# Altium schematic symbol library Fred,.SchLib: 50 symbols (part 1 of 2)
Pins are listed as number, name and electrical type; pins without a type are passive.

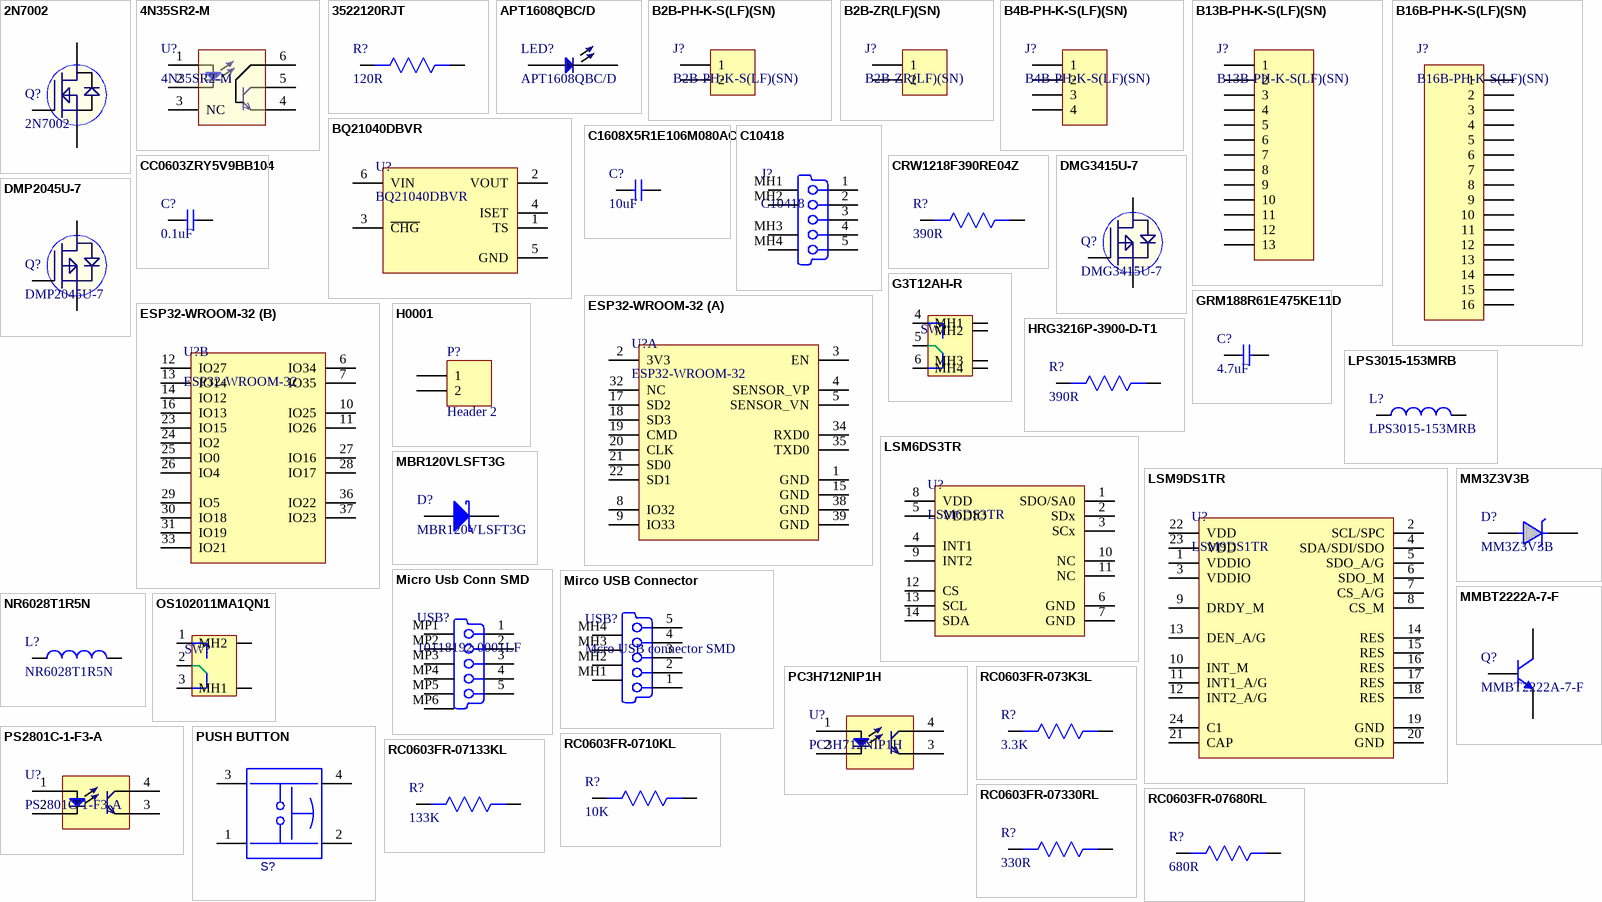
[diagram p0: symbols 2N7002 to RC0603FR-07680RL]

## 2N7002
designator Q?
MOSFET N-CH 60V 115MA SOT-23; Manufacturer: ON Semiconductor / Fairchild; Max Power Dissipation: 200mW; Drain to Source Resistance: 1.2R; Gate to Source Voltage (Vgs): 20V; Nominal Vgs: 2.1V; Number of Elements: 1; Element Configuration: Single; Input Capacitance: 50pF; Rds On Max: 7.5R; On-State Resistance: 5.3R; Supplier 1: Digi-Key; Manufacturer Part Number: 2N7002; Stock 1: 809412; Pricing 1: 1=0.39, 10=0.358, 100=0.2007, 500=0.1075, 1000=0.0731 (USD); Mount: Surface Mount; Case/Package: SOT-23; Number of Pins: 3; Contact Plating: Matte,Tin; Min Operating Temperature: -55°C; Max Operating Temperature: 150°C; Continuous Drain Current (ID): 115mA; Packaging: Tape and Reel; Package Quantity: 1; Drain to Source Breakdown Voltage: 60V; Power Dissipation: 200mW; Threshold Voltage: 2.1V; Drain to Source Voltage (Vdss): 60V; Voltage Rating (DC): 60V; Current Rating: 115mA; Dual Supply Voltage: 60V; Current: 115mA; Voltage: 60V; Length: 2.92mm; Height: 0.93mm; Width: 3.05mm; Radiation Hardening: No; REACH SVHC: No SVHC; Lead Free: Lead Free; ComponentLink1URL: http://www.farnell.com/datasheets/2299562.pdf?src-supplier=Farnell; ComponentLink1Description: http://www.farnell.com/datasheets/2299562.pdf?src-supplier=Farnell; ComponentLink2URL: http://www.rapidonline.com/pdf/47-0120.pdf?src-supplier=Rapid+Electronics; ComponentLink2Description: http://www.rapidonline.com/pdf/47-0120.pdf?src-supplier=Rapid+Electronics; ComponentLink3URL: https://www.fairchildsemi.com/package-drawings/MA/MA03B.pdf?src-supplier=Digi-Key; ComponentLink3Description: https://www.fairchildsemi.com/package-drawings/MA/MA03B.pdf?src-supplier=Digi-Key; ComponentLink4URL: http://www.farnell.com/datasheets/2299562.pdf?src-supplier=Newark; ComponentLink4Description: http://www.farnell.com/datasheets/2299562.pdf?src-supplier=Newark; ComponentLink5URL: https://www.onsemi.com/pub/Collateral/NDS7002A-D.PDF?src-supplier=Digi-Key; ComponentLink5Description: https://www.onsemi.com/pub/Collateral/NDS7002A-D.PDF?src-supplier=Digi-Key; ComponentLink6URL: http://www.farnell.com/datasheets/2161371.pdf?src-supplier=Element14; ComponentLink6Description: http://www.farnell.com/datasheets/2161371.pdf?src-supplier=Element14; ComponentLink7URL: http://www.farnell.com/datasheets/2299562.pdf?src-supplier=Element14; ComponentLink7Description: http://www.farnell.com/datasheets/2299562.pdf?src-supplier=Element14; ComponentLink8URL: https://www.verical.com/server-webapp/html/getDatasheet?partID=93547&src-supplier=Verical; ComponentLink8Description: https://www.verical.com/server-webapp/html/getDatasheet?partID=93547&src-supplier=Verical; ComponentLink9URL: http://www.fairchildsemi.com/ds/2N/2N7002.pdf?src-supplier=Future+Electronics; ComponentLink9Description: http://www.fairchildsemi.com/ds/2N/2N7002.pdf?src-supplier=Future+Electronics; ComponentLink10URL: https://www.fairchildsemi.com/datasheets/ND/NDS7002A.pdf?src-supplier=Avnet; ComponentLink10Description: https://www.fairchildsemi.com/datasheets/ND/NDS7002A.pdf?src-supplier=Avnet; ComponentLink11URL: http://www.farnell.com/datasheets/660093.pdf?src-supplier=Element14; ComponentLink11Description: http://www.farnell.com/datasheets/660093.pdf?src-supplier=Element14; Supplier Part Number 1: 2N7002NCT-ND
footprint SOT23-3 (SOT23, 3-Leads, Body 2.9x1.3mm, Pitch 0.95mm, Lead Span 2.3mm - Reverse Pinning, IPC High Density)
pins: 1 G, 2 S, 3 D

## 4N35SR2-M
designator U?
OPTOISO 4.17KV TRANS W/BASE 6SMD; Manufacturer: ON Semiconductor / Fairchild; Number of Channels: 1; Collector Emitter Voltage (VCEO): 300mV; Output Voltage: 30V; Max Power Dissipation: 150mW; Isolation Voltage: 7.5kV; Reverse Breakdown Voltage: 6V; Forward Voltage: 1.5V; Forward Current: 60mA; Power Dissipation: 250mW; Rise Time: 2us; Supplier 1: Digi-Key; Manufacturer Part Number: 4N35SR2-M; Stock 1: 7245; Pricing 1: 1=0.76, 10=0.59, 100=0.4214, 500=0.3203 (USD); Mount: Surface Mount; Case/Package: SMD/SMT; Number of Pins: 6; Weight: 0.81g; Contact Plating: Tin,Matte; Min Operating Temperature: -40°C; Max Operating Temperature: 100°C; Packaging: Tape and Reel; Package Quantity: 1000; Collector Emitter Saturation Voltage: 300mV; Number of Elements: 1; Max Input Current: 60mA; Max Output Voltage: 30V; Number of Circuits: 1; Input Current: 60mA; Fall Time: 2us; Radiation Hardening: No; Lead Free: Lead Free; REACH SVHC: No SVHC; ComponentLink1URL: https://datasheet.ciiva.com/15118/getdatasheetpartid-91040-15118536.pdf; ComponentLink1Description: https://datasheet.ciiva.com/15118/getdatasheetpartid-91040-15118536.pdf; ComponentLink2URL: https://datasheet.ciiva.com/16924/4n25sr2vm-16924344.pdf; ComponentLink2Description: https://datasheet.ciiva.com/16924/4n25sr2vm-16924344.pdf; ComponentLink3URL: https://datasheet.ciiva.com/2085/4n25m-2085930.pdf; ComponentLink3Description: https://datasheet.ciiva.com/2085/4n25m-2085930.pdf; ComponentLink4URL: https://datasheet.ciiva.com/22654/1930104-22654266.pdf; ComponentLink4Description: https://datasheet.ciiva.com/22654/1930104-22654266.pdf; ComponentLink5URL: https://datasheet.ciiva.com/2085/4n25m-2085931.pdf; ComponentLink5Description: https://datasheet.ciiva.com/2085/4n25m-2085931.pdf; ComponentLink6URL: https://datasheet.ciiva.com/3305/4n25m-3305947.pdf; ComponentLink6Description: https://datasheet.ciiva.com/3305/4n25m-3305947.pdf; ComponentLink7URL: https://datasheet.ciiva.com/22654/683405-22654267.pdf; ComponentLink7Description: https://datasheet.ciiva.com/22654/683405-22654267.pdf; ComponentLink8URL: https://datasheet.ciiva.com/2085/4n25m-2085932.pdf; ComponentLink8Description: https://datasheet.ciiva.com/2085/4n25m-2085932.pdf; ComponentLink9URL: https://datasheet.ciiva.com/26121/4n25m-26121741.pdf; ComponentLink9Description: https://datasheet.ciiva.com/26121/4n25m-26121741.pdf; ComponentLink10URL: https://datasheet.ciiva.com/8084/4n25m-8084975.pdf; ComponentLink10Description: https://datasheet.ciiva.com/8084/4n25m-8084975.pdf; Supplier Part Number 1: 4N35SR2MCT-ND
footprint 4N25/35M SM (4N25/35M SurfaceMount FP)
pins: 1 An, 2 Ca, 3 NC, 4 E, 5 C, 6 B

## 3522120RJT
designator R?, comment 120R
RES SMD 120 OHM 5% 3W 2512; Manufacturer: TE Connectivity CGS; Manufacturer Part Number: 3522120RJT; Voltage Rating: 250V; Number of Resistors: 1; Temperature Coefficient: 100ppm/°C; Supplier 1: Digi-Key; Stock 1: 33369; Pricing 1: 1=0.65, 10=0.541, 100=0.3634, 1000=0.21265 (USD); Mount: Surface Mount; Case/Package: 2512; Case Code (Metric): 6432; Case Code (Imperial): 2512; Min Operating Temperature: -55°C; Max Operating Temperature: 105°C; Resistance: 120R; Power Rating: 3W; Packaging: Tape and Reel; Composition: Power resistor,Thick Film; Termination: Solder; Tolerance: 5%; Voltage Rating (DC): 250V; Number of Terminations: 2; Length: 6.35mm; Height: 1.1mm; Depth: 3.2mm; REACH SVHC: Unknown; Supplier Part Number 1: A121132CT-ND
footprint Res2512
pins: 1, 2

## APT1608QBC/D
designator LED?
LED BLUE CLEAR CHIP SMD; Manufacturer: Kingbright; Lens Color: Clear,Colorless; Luminous Intensity: 100mcd; Viewing Angle: 120°; Lens Style: Clear,Flat; Forward Current: 20mA; Forward Voltage: 3.3V; Dominant Wavelength: 465nm; Number of LEDs: 1; Supplier 1: Digi-Key; Manufacturer Part Number: APT1608QBC/D; Stock 1: 106851; Pricing 1: 1=0.49, 10=0.35, 25=0.286, 100=0.2288, 250=0.19304, 500=0.16446, 1000=0.1287 (USD); Mount: Surface Mount; Case/Package: 0603; Number of Pins: 2; Color: Blue; Case Code (Metric): 1608; Case Code (Imperial): 0603; Min Operating Temperature: -40°C; Max Operating Temperature: 85°C; Package Quantity: 2000; Packaging: Tape and Reel; Illumination Color: Blue; Lens Transparency: Clear; Test Current: 20mA; Length: 1.6mm; Height: 0.75mm; Width: 0.8mm; Lead Free: Lead Free; ComponentLink1URL: http://www.kingbrightusa.com/images/catalog/SPEC/APT1608QBC-D.pdf?src-supplier=Digi-Key; ComponentLink1Description: http://www.kingbrightusa.com/images/catalog/SPEC/APT1608QBC-D.pdf?src-supplier=Digi-Key; ComponentLink2URL: http://www.mouser.com/ds/2/216/APT1608QBC-D-65281.pdf?src-supplier=Mouser; ComponentLink2Description: http://www.mouser.com/ds/2/216/APT1608QBC-D-65281.pdf?src-supplier=Mouser; Supplier Part Number 1: 754-1434-1-ND
footprint LED 0603 (LED BLUE CLEAR CHIP SMD)
pins: 1, 2

## B2B-PH-K-S(LF)(SN)
designator J?
CONN HEADER VERT 2POS 2MM; Manufacturer: JST; Supplier 1: Digi-Key; Manufacturer Part Number: B2B-PH-K-S(LF)(SN); Stock 1: 36331; Pricing 1: 1=0.17, 10=0.162, 100=0.1002, 500=0.08288, 1000=0.07252, 5000=0.06216, 10000=0.06044 (USD); Weight: 0.0625lb; Length: 0.2inch; Height: 0.35inch; Width: 0.24inch; Supplier Part Number 1: 455-1704-ND
footprint B2B-PH-K-S(LF)(SN)
pins: 1, 2

## B2B-ZR(LF)(SN)
designator J?
CONN HEADER VERT 2POS 1.5MM; Manufacturer: JST; Body Plating: Tin; Number of Positions: 2; Connector Type: Header,Male Pin; Contact Resistance: 30mR; Current Rating: 1A; Insulation Resistance: 500MR; Voltage Rating: 50V; Gender: Male; Panel Thickness: 3.5mm; Supplier 1: Arrow; Manufacturer Part Number: B2B-ZR(LF)(SN); Stock 1: 6766; Pricing 1: 1=0.1706, 10=0.1605, 100=0.0982, 500=0.0747 (USD); Mount: Through Hole; Color: White; Contact Plating: Tin,Copper; Contact Material: Brass,Copper,Tin; Housing Material: Polyamide; Material: Nylon; Housing Color: Beige; Contact Shape: Circular; Insulation Material: Nylon; Insulation Color: Natural; Min Operating Temperature: -25°C; Max Operating Temperature: 85°C; Number of Rows: 1; Packaging: Bulk; Termination: Solder; Max Current Rating: 1A; Voltage Rating (AC): 50V; Voltage Rating (DC): 50V; Fastening Type: Detent; Max Voltage Rating (AC): 50V; Number of Contacts: 2; Orientation: Straight; Length: 4.5mm; Pitch: 1.5mm; Lead Pitch: 1.5mm; Contact Mating Length: 0.094inch; Depth: 3.5mm; Lead Free: Lead Free; REACH SVHC: No SVHC; Flammability Rating: UL94 V-0; ComponentLink1URL: https://www.verical.com/server-webapp/html/getDatasheet?partID=643133&src-supplier=Verical; ComponentLink1Description: https://www.verical.com/server-webapp/html/getDatasheet?partID=643133&src-supplier=Verical; ComponentLink2URL: http://uk.rs-online.com/webdocs/13ec/0900766b813eca01.pdf?src-supplier=RSComponents; ComponentLink2Description: http://uk.rs-online.com/webdocs/13ec/0900766b813eca01.pdf?src-supplier=RSComponents; ComponentLink3URL: http://www.farnell.com/datasheets/80551.pdf?src-supplier=Element14; ComponentLink3Description: http://www.farnell.com/datasheets/80551.pdf?src-supplier=Element14; ComponentLink4URL: http://uk.rs-online.com/webdocs/13ed/0900766b813ed0cc.pdf?src-supplier=RSComponents; ComponentLink4Description: http://uk.rs-online.com/webdocs/13ed/0900766b813ed0cc.pdf?src-supplier=RSComponents; ComponentLink5URL: http://www.jst-mfg.com/product/pdf/eng/eZH.pdf?src-supplier=Digi-Key; ComponentLink5Description: http://www.jst-mfg.com/product/pdf/eng/eZH.pdf?src-supplier=Digi-Key; Supplier Part Number 1: B2B-ZR (LF)(SN)
footprint B2B-ZR(LF)(SN) (CONN HEADER VERT 2POS 1.5MM)
pins: 1, 2

## B4B-PH-K-S(LF)(SN)
designator J?
CONN HEADER VERT 4POS 2MM; Manufacturer: JST; Current Rating: 2A; Voltage Rating: 100V; Contact Resistance: 20mR; Number of Poles: 4; Insulation Resistance: 1MR; Gender: Male; Connector Type: Male Pin; Supplier 1: Digi-Key; Manufacturer Part Number: B4B-PH-K-S(LF)(SN); Stock 1: 60295; Pricing 1: 1=0.24, 10=0.227, 100=0.1573, 500=0.13312, 1000=0.10892, 5000=0.09682, 10000=0.08774 (USD); Mount: Through Hole; Number of Pins: 4; Contact Material: Brass,Tin; Contact Plating: Tin,Copper; Color: Natural; Housing Color: White; Housing Material: Polyamide; Material: Polyamide; Min Operating Temperature: -25°C; Max Operating Temperature: 85°C; Number of Rows: 1; Max Current Rating: 2A; Voltage Rating (AC): 100V; Packaging: Bulk; Number of Positions: 4; Termination: Solder; Fastening Type: Detent; Number of Contacts: 4; Max Voltage Rating (AC): 100V; Max Voltage Rating (DC): 100V; Working Voltage: 100V; Orientation: Straight; Length: 9.9mm; Height: 9.4mm; Width: 4.5mm; Pitch: 2mm; Lead Pitch: 2mm; Contact Mating Length: 0.13inch; Depth: 4.5mm; REACH SVHC: No SVHC; Lead Free: Lead Free; ComponentLink1URL: http://www.jst-mfg.com/product/pdf/eng/ePH.pdf?src-supplier=Digi-Key; ComponentLink1Description: http://www.jst-mfg.com/product/pdf/eng/ePH.pdf?src-supplier=Digi-Key; ComponentLink2URL: http://www.jst-mfg.com/product/pdf/eng/ePH.pdf?src-supplier=Future+Electronics; ComponentLink2Description: http://www.jst-mfg.com/product/pdf/eng/ePH.pdf?src-supplier=Future+Electronics; ComponentLink3URL: http://www.produktinfo.conrad.com/datenblaetter/725000-749999/741223-da-01-en-STIFTLEISTE_GERADE_4_POL_RM2_0.pdf?src-supplier=Conrad; ComponentLink3Description: http://www.produktinfo.conrad.com/datenblaetter/725000-749999/741223-da-01-en-STIFTLEISTE_GERADE_4_POL_RM2_0.pdf?src-supplier=Conrad; Supplier Part Number 1: 455-1706-ND
footprint B4B-PH-K-S(LF)(SN)
pins: 1, 2, 3, 4

## B13B-PH-K-S(LF)(SN)
designator J?
CONN HEADER VERT 13POS 2MM; Manufacturer: JST; Current Rating: 2A; Number of Positions: 13; Gender: Male; Connector Type: Male Pin; Pitch: 0.079inch; Supplier 1: Digi-Key; Manufacturer Part Number: B13B-PH-K-S(LF)(SN); Stock 1: 5302; Pricing 1: 1=0.59, 10=0.549, 100=0.4206, 500=0.36574, 1000=0.30173, 5000=0.26516, 10000=0.24687 (USD); Mount: Through Hole; Contact Material: Tin; Color: Natural; Contact Plating: Tin; Housing Color: Natural; Number of Rows: 1; Packaging: Bulk; Termination: Press-Fit; Fastening Type: Detent; Number of Contacts: 13; Length: 27.9mm; Height: 9.4mm; Width: 4.5mm; Contact Mating Length: 0.13inch; Lead Free: Lead Free; Supplier Part Number 1: 455-1715-ND
footprint B13B-PH-K-S(LF)(SN)
pins: 1, 2, 3, 4, 5, 6, 7, 8, 9, 10, 11, 12, 13

## B16B-PH-K-S(LF)(SN)
designator J?
CONN HEADER VERT 16POS 2MM; Manufacturer: JST; Current Rating: 2A; Number of Positions: 16; Gender: Male; Connector Type: Male Pin; Voltage Rating: 100V; Insulation Resistance: 1GR; Pitch: 0.079inch; ComponentLink1URL: http://www.jst-mfg.com/product/pdf/eng/ePH.pdf?src-supplier=Digi-Key; ComponentLink1Description: http://www.jst-mfg.com/product/pdf/eng/ePH.pdf?src-supplier=Digi-Key; Supplier 1: Digi-Key; Manufacturer Part Number: B16B-PH-K-S(LF)(SN); Stock 1: 3736; Pricing 1: 1=0.76, 10=0.717, 100=0.5495, 500=0.47782, 1000=0.3942, 5000=0.34641, 10000=0.32252 (USD); Mount: Through Hole; Color: Natural; Contact Plating: Tin; Housing Color: Natural; Contact Material: Brass; Material: Polyamide; Min Operating Temperature: -25°C; Max Operating Temperature: 85°C; Number of Rows: 1; Packaging: Bulk; Termination: Press-Fit; Fastening Type: Detent; Number of Contacts: 16; Contact Mating Length: 0.13inch; Lead Free: Lead Free; Supplier Part Number 1: 455-1718-ND
footprint B16B-PH-K-S(LF)(SN) (CONN HEADER VERT 16POS 2MM)
pins: 1, 2, 3, 4, 5, 6, 7, 8, 9, 10, 11, 12, 13, 14, 15, 16

## BQ21040DBVR
designator U?
IC BAT CHG LI-ION 1 CELL SOT23-6; Manufacturer: Texas Instruments; Number of Cells: 1; Supplier 1: Digi-Key; Manufacturer Part Number: BQ21040DBVR; Stock 1: 10857; Pricing 1: 1=1.14, 10=1.015, 100=0.7912, 500=0.65364, 1000=0.51603 (USD); Lead Free: Lead Free; Supplier Part Number 1: 296-47315-1-ND
footprint BQ21040DBVR
pins: 1 TS, 2 VOUT, 3 ~{CHG}, 4 ISET, 5 GND, 6 VIN

## C1608X5R1E106M080AC
designator C?, comment 10uF
CAP CER 10UF 25V X5R 0603; Manufacturer: TDK; Manufacturer Part Number: C1608X5R1E106M080AC; Dielectric Material: Ceramic; Tolerance: 20%; Supplier 1: Digi-Key; Stock 1: 61681; Pricing 1: 1=0.96, 10=0.704, 100=0.483, 500=0.38238, 1000=0.322 (USD); Mount: Surface Mount; Case/Package: 0603; Weight: 7.1E-05oz; Case Code (Imperial): 0603; Case Code (Metric): 1608; Min Operating Temperature: -55°C; Max Operating Temperature: 85°C; Capacitance: 10uF; Packaging: Tape and Reel; Voltage Rating: 25V; Voltage Rating (DC): 25V; Termination: SMD/SMT; Package Quantity: 1; Dielectric: X5R; Composition: Ceramic; Length: 1.6mm; Height: 0.8mm; Width: 0.8mm; Thickness: 0.039inch; Depth: 0.8mm; Lead Free: Lead Free; REACH SVHC: No SVHC; Supplier Part Number 1: 445-9015-1-ND
footprint Cap0603
pins: 1, 2

## C10418
designator J?
USB - Micro B Female USB 2 5 SMD USB Connectors RoHS; Manufacturer: Jing Extension of the Electronic Co.; Gender: Receptacle; Connector Type: USB,Receptacle; Number of Contacts: 5; Number of Ports: 1; Manufacturer Part Number: C10418; Mount: Surface Mount,Horizontal; Number of Terminals: 5; Termination: Solder; Orientation: Right Angle; ComponentLink1URL: http://www.amphenol-icc.com/media/wysiwyg/files/drawing/10118194.pdf?src-supplier=Digi-Key; ComponentLink1Description: http://www.amphenol-icc.com/media/wysiwyg/files/drawing/10118194.pdf?src-supplier=Digi-Key; ComponentLink2URL: https://cdn.amphenol-icc.com/media/wysiwyg/files/drawing/10118194.pdf?src-supplier=Mouser; ComponentLink2Description: https://cdn.amphenol-icc.com/media/wysiwyg/files/drawing/10118194.pdf?src-supplier=Mouser; ComponentLink3URL: https://cdn.amphenol-icc.com/media/wysiwyg/files/drawing/10118194.pdf?src-supplier=Verical; ComponentLink3Description: https://cdn.amphenol-icc.com/media/wysiwyg/files/drawing/10118194.pdf?src-supplier=Verical; Link: https://lcsc.com/product-detail/USB-Connectors_Jing-Extension-of-the-Electronic-Co-C10418_C10418.html
footprint C10418 (USB - Micro B Female USB 2 5 SMD USB Connectors RoHS)
pins: 1 V BUS (5V) "USB Vcc [Red]", 2 D- "USB Data - [White]", 3 D+ "USB Data + [Green]", 4 NC "Not Connected (or joined to pin 5 via resistor)", 5 GND "Ground [Black]", MH1 Tab "Shell", MH2 Tab "Shell", MH3 Tab "Shell", MH4 Tab "Shell"

## CC0603ZRY5V9BB104
designator C?, comment 0.1uF
CAP CER 0.1UF 50V Y5V 0603; Manufacturer: Yageo; Manufacturer Part Number: CC0603ZRY5V9BB104; Capacitance: 100nF; Tolerance: 80%; Supplier 1: Digi-Key; Stock 1: 15000880; Pricing 1: 1=0.1, 10=0.075, 100=0.0334, 500=0.02386, 1000=0.01874 (USD); Mount: Surface Mount; Case/Package: 0603; Number of Pins: 2; Case Code (Metric): 1608; Case Code (Imperial): 0603; Min Operating Temperature: -30°C; Max Operating Temperature: 85°C; Dielectric: Y5V; Voltage Rating: 50V; Package Quantity: 1; Packaging: Tape and Reel; Voltage Rating (DC): 50V; Termination: SMD/SMT; Composition: Ceramic; Voltage: 50V; Length: 1.6mm; Height: 0.8mm; Width: 0.031inch; Thickness: 0.035inch; Depth: 0.8mm; Radiation Hardening: No; REACH SVHC: No SVHC; Lead Free: Lead Free; Halogen Free: Halogen Free; ComponentLink1URL: http://www.yageo.com/documents/recent/UPY-GPHC_Y5V_6.3V-to-50V_8.pdf?src-supplier=Digi-Key; ComponentLink1Description: http://www.yageo.com/documents/recent/UPY-GPHC_Y5V_6.3V-to-50V_8.pdf?src-supplier=Digi-Key; ComponentLink2URL: http://www.yageo.com/documents/recent/UPY-GPHC_Y5V_6.3V-to-50V_5.pdf?src-supplier=Avnet+Europe; ComponentLink2Description: http://www.yageo.com/documents/recent/UPY-GPHC_Y5V_6.3V-to-50V_5.pdf?src-supplier=Avnet+Europe; ComponentLink3URL: https://www.verical.com/server-webapp/html/getDatasheet?partID=403611&src-supplier=Verical; ComponentLink3Description: https://www.verical.com/server-webapp/html/getDatasheet?partID=403611&src-supplier=Verical; ComponentLink4URL: http://www.mouser.com/ds/2/447/Yageo_UPY-GP_NP0_16V-to-50V_9-358835.pdf?src-supplier=Mouser; ComponentLink4Description: http://www.mouser.com/ds/2/447/Yageo_UPY-GP_NP0_16V-to-50V_9-358835.pdf?src-supplier=Mouser; ComponentLink5URL: http://www.farnell.com/datasheets/1132289.pdf?src-supplier=Element14; ComponentLink5Description: http://www.farnell.com/datasheets/1132289.pdf?src-supplier=Element14; Supplier Part Number 1: 311-1343-1-ND
footprint Cap0603
pins: 1, 2

## CRW1218F390RE04Z
designator R?, comment 390R
RES SMD 390 OHM ±1% 1W ±100ppm/℃ 1218 Chip Resistor; Manufacturer: Ever Ohms Tech; Manufacturer Part No.: CRW1218F390RE04Z; Case/Package: 1218; Resistance: 390R; Termination: SMD/SMT; ComponentLink1URL: http://www.yageo.com.tw/exep/pages/download/literatures/PYu-R_INT-thick_7.pdf?src-supplier=Digi-Key; ComponentLink1Description: http://www.yageo.com.tw/exep/pages/download/literatures/PYu-R_INT-thick_7.pdf?src-supplier=Digi-Key; ComponentLink2URL: http://www.yageo.com/documents/recent/PYu-RC_Group_51_RoHS_L_10.pdf?src-supplier=Digi-Key; ComponentLink2Description: http://www.yageo.com/documents/recent/PYu-RC_Group_51_RoHS_L_10.pdf?src-supplier=Digi-Key; ComponentLink3URL: http://www.yageo.com/documents/recent/PYu-RC_Group_51_RoHS_L_9.pdf?src-supplier=Digi-Key; ComponentLink3Description: http://www.yageo.com/documents/recent/PYu-RC_Group_51_RoHS_L_9.pdf?src-supplier=Digi-Key; ComponentLink4URL: http://www.farnell.com/datasheets/443971.pdf?src-supplier=Element14; ComponentLink4Description: http://www.farnell.com/datasheets/443971.pdf?src-supplier=Element14; Supplier: LCSC; Supplier Part No.: C175553; Link: https://lcsc.com/product-detail/Chip-Resistor-Surface-Mount_Ever-Ohms-Tech-CR1218F390RE04_C175553.html
footprint Res1218
pins: 1, 2

## DMG3415U-7
designator Q?
MOSFET P-CH 20V 4A SOT-23; Manufacturer: Diodes; Rise Time: 117ns; Gate to Source Voltage (Vgs): 8V; Fall Time: 393ns; Turn-Off Delay Time: 795ns; Turn-On Delay Time: 71ns; Rds On Max: 39mR; Input Capacitance: 294pF; Nominal Vgs: -550mV; Number of Elements: 1; Max Power Dissipation: 900mW; Drain to Source Resistance: 42.5mR; Element Configuration: Single; Drain to Source Breakdown Voltage: -20V; Supplier 1: Digi-Key; Manufacturer Part Number: DMG3415U-7; Stock 1: 330988; Pricing 1: 1=0.54, 10=0.38, 100=0.2493, 500=0.1473, 1000=0.1133 (USD); Mount: Surface Mount; Case/Package: SOT-23; Number of Pins: 3; Weight: 0.000282oz; Contact Plating: Matte,Tin; Min Operating Temperature: -55°C; Max Operating Temperature: 150°C; Continuous Drain Current (ID): 4A; Packaging: Tape and Reel; Package Quantity: 3000; Drain to Source Voltage (Vdss): 20V; Number of Channels: 1; Power Dissipation: 900mW; Threshold Voltage: -550mV; On-State Resistance: 42.5mR; Length: 2.9mm; Height: 1mm; Width: 1.3mm; Radiation Hardening: No; REACH SVHC: No SVHC; Lead Free: Lead Free; ComponentLink1URL: http://www.diodes.com/datasheets/ds31735.pdf?src-supplier=Avnet; ComponentLink1Description: http://www.diodes.com/datasheets/ds31735.pdf?src-supplier=Avnet; ComponentLink2URL: https://www.diodes.com/assets/Datasheets/ds31735.pdf?src-supplier=Digi-Key; ComponentLink2Description: https://www.diodes.com/assets/Datasheets/ds31735.pdf?src-supplier=Digi-Key; ComponentLink3URL: http://www.mouser.com/ds/2/115/ds31735-64958.pdf?src-supplier=Mouser; ComponentLink3Description: http://www.mouser.com/ds/2/115/ds31735-64958.pdf?src-supplier=Mouser; ComponentLink4URL: http://www.farnell.com/datasheets/1915618.pdf?src-supplier=Element14; ComponentLink4Description: http://www.farnell.com/datasheets/1915618.pdf?src-supplier=Element14; ComponentLink5URL: http://www.diodes.com/_files/datasheets/ds31735.pdf?src-supplier=Future+Electronics; ComponentLink5Description: http://www.diodes.com/_files/datasheets/ds31735.pdf?src-supplier=Future+Electronics; Supplier Part Number 1: DMG3415UDIDKR-ND
footprint SOT23-3 (SOT23, 3-Leads, Body 2.9x1.3mm, Pitch 0.95mm, Lead Span 2.3mm - Reverse Pinning, IPC High Density)
pins: 1 G, 2 S, 3 D

## DMP2045U-7
designator Q?
MOSFET P-CHAN 24V SOT23
footprint SOT23-3 (SOT23, 3-Leads, Body 2.9x1.3mm, Pitch 0.95mm, Lead Span 2.3mm - Reverse Pinning, IPC High Density)
pins: 1 G, 2 S, 3 D

## ESP32-WROOM-32
designator U?
SMD MODULE, ESP32-D0WDQ6, 32MBIT; Manufacturer: Espressif Systems; Supplier 1: Digi-Key; Manufacturer Part Number: ESP32-WROOM-32; Stock 1: 968; Pricing 1: 1=3.8 (USD); Supplier Part Number 1: 1904-1010-1-ND
footprint ESP32-WROOM-32 (SMD MODULE, ESP32-D0WDQ6, 32MBIT)
part A pins: 1 GND, 2 3V3, 3 EN, 4 SENSOR_VP, 5 SENSOR_VN, 8 IO32, 9 IO33, 15 GND, 17 SD2, 18 SD3, 19 CMD, 20 CLK, 21 SD0, 22 SD1, 32 NC, 34 RXD0, 35 TXD0, 38 GND, 39 GND
part B pins: 6 IO34, 7 IO35, 10 IO25, 11 IO26, 12 IO27, 13 IO14, 14 IO12, 16 IO13, 23 IO15, 24 IO2, 25 IO0, 26 IO4, 27 IO16, 28 IO17, 29 IO5, 30 IO18, 31 IO19, 33 IO21, 36 IO22, 37 IO23

## G3T12AH-R
designator SW?  (value not drawn)
Toggle Switch SPDT Surface Mount, Right Angle 0.4VA 28V; Manufacturer: NKK Switches; Actuator Material: Polyphenylene; Max Current Rating: 100mA; Illumination Type: Non-Illuminated,Illuminated; Electrical Life: 50000Cycles; Switch Function: On-On; Actuator Type: Standard Round; Actuator Length: 3.81mm; ComponentLink1URL: http://www.jameco.com/Jameco/Products/ProdDS/588220.pdf?src-supplier=Jameco; ComponentLink1Description: http://www.jameco.com/Jameco/Products/ProdDS/588220.pdf?src-supplier=Jameco; ComponentLink2URL: http://uk.rs-online.com/webdocs/1263/0900766b81263f61.pdf?src-supplier=RSComponents; ComponentLink2Description: http://uk.rs-online.com/webdocs/1263/0900766b81263f61.pdf?src-supplier=RSComponents; ComponentLink3URL: http://www.farnell.com/datasheets/1683358.pdf?src-supplier=Element14; ComponentLink3Description: http://www.farnell.com/datasheets/1683358.pdf?src-supplier=Element14; ComponentLink4URL: http://www1.futureelectronics.com/doc/C%20-%20K%20COMPONENTS/OS102011MA1QN1.pdf?src-supplier=Future+Electronics; ComponentLink4Description: http://www1.futureelectronics.com/doc/C%20-%20K%20COMPONENTS/OS102011MA1QN1.pdf?src-supplier=Future+Electronics; ComponentLink5URL: https://www.ckswitches.com/media/1428/os.pdf?src-supplier=Digi-Key; ComponentLink5Description: https://www.ckswitches.com/media/1428/os.pdf?src-supplier=Digi-Key; ComponentLink6URL: https://www.alliedelec.com/m/d/08271ccc8b1809c6b911a7d3c93f3e8a.pdf?src-supplier=Allied+Electronics; ComponentLink6Description: https://www.alliedelec.com/m/d/08271ccc8b1809c6b911a7d3c93f3e8a.pdf?src-supplier=Allied+Electronics; ComponentLink7URL: http://www.farnell.com/datasheets/2674787.pdf?src-supplier=Newark; ComponentLink7Description: http://www.farnell.com/datasheets/2674787.pdf?src-supplier=Newark; Supplier 1: Digi-Key; Manufacturer Part Number: G3T12AH-R; Stock 1: 1957; Pricing 1: 1=5.17, 10=4.928, 25=4.8048, 50=4.6816, 100=4.5584, 250=4.1888 (USD); Mount: Surface Mount; Case/Package: SMD/SMT; Contact Material: Bronze; Contact Plating: Gold; Housing Material: Resin; Min Operating Temperature: -30°C; Max Operating Temperature: 85°C; Package Quantity: 1; Voltage Rating (AC): 28V; Voltage Rating (DC): 28V; Packaging: Tape and Reel; Throw Configuration: SPDT; Max Voltage Rating (AC): 28V; Max Voltage Rating (DC): 28V; Termination: Gull Wing; Orientation: Right Angle; Length: 11mm; Depth: 13.35mm; REACH SVHC: No SVHC; Lead Free: Lead Free; ComponentLink8URL: http://www.nkk.com/documents/products/pushbutton/g/G3Toggles.pdf?src-supplier=Digi-Key; ComponentLink8Description: http://www.nkk.com/documents/products/pushbutton/g/G3Toggles.pdf?src-supplier=Digi-Key; Supplier Part Number 1: 360-1773-1-ND
footprint G3T12AH-R (Toggle Switch SPDT Surface Mount, Right Angle 0.4VA 28V)
pins: 4 +, 5 +, 6 +, MH1, MH2, MH3, MH4

## GRM188R61E475KE11D
designator C?, comment 4.7uF
CAP CER 4.7UF 25V X5R 0603; Manufacturer: Murata; Manufacturer Part Number: GRM188R61E475KE11D; Material: Ceramic; Tolerance: 10%; Supplier 1: Digi-Key; Stock 1: 71618; Pricing 1: 1=0.37, 10=0.258, 100=0.1549, 500=0.1162, 1000=0.09812 (USD); Mount: Surface Mount; Case/Package: 0603; Case Code (Metric): 1608; Case Code (Imperial): 0603; Min Operating Temperature: -55°C; Max Operating Temperature: 85°C; Package Quantity: 4000; Packaging: Cut Tape; Capacitance: 4.7uF; Voltage Rating: 25V; Dielectric: X5R; Voltage: 25V; Voltage Rating (DC): 25V; Length: 1.6mm; Height: 0.8mm; Width: 0.031inch; Thickness: 0.031inch; Depth: 0.8mm; REACH SVHC: No SVHC; Lead Free: Lead Free; ComponentLink1URL: http://www.farnell.com/datasheets/2048165.pdf?src-supplier=Element14; ComponentLink1Description: http://www.farnell.com/datasheets/2048165.pdf?src-supplier=Element14; ComponentLink2URL: https://www.murata.com/~/media/webrenewal/support/library/catalog/products/capacitor/mlcc/c02e.ashx?la=en-us&src-supplier=Digi-Key; ComponentLink2Description: https://www.murata.com/~/media/webrenewal/support/library/catalog/products/capacitor/mlcc/c02e.ashx?la=en-us&src-supplier=Digi-Key; Supplier Part Number 1: 490-7203-1-ND
footprint Cap0603
pins: 1, 2

## H0001
designator P?, comment Header 2
Header, 2-Pin; Manufacturer: Harwin; Manufacturer Part Number: M20-9990246; Number of Contacts: 2; Current Rating: 3A; Contact Resistance: 30mR; Gender: Male; Insulation Resistance: 10GR; Voltage Rating (AC): 750V; Connector Type: Male Pin; Pitch: 2.54mm; Supplier 1: Mouser; Stock 1: 30633; Pricing 1: 1=0.1, 10=0.063, 50=0.063, 100=0.05, 1000=0.044, 10000=0.034 (USD); Mount: Through Hole; Case/Package: SIL; Contact Plating: Tin; Colour: Black; Contact Material: Bronze,Brass; Housing Colour: Black; Housing Material: Nylon; Min Operating Temperature: -40°C; Max Operating Temperature: 105°C; Number of Rows: 1; Termination: Solder; Package Quantity: 1000; Packaging: Bulk; Max Current Rating: 3A; Number of Positions: 2; Orientation: Straight; Length: 5.08mm; Contact Mating Length: 0.24inch; Depth: 2.54mm; Radiation Hardening: No; REACH SVHC: No SVHC; ComponentLink1URL: https://datasheet.ciiva.com/11745/0900766b81034e61-11745755.pdf; ComponentLink1Description: https://datasheet.ciiva.com/11745/0900766b81034e61-11745755.pdf; ComponentLink2URL: https://datasheet.ciiva.com/22660/1830818-22660571.pdf; ComponentLink2Description: https://datasheet.ciiva.com/22660/1830818-22660571.pdf; ComponentLink3URL: https://datasheet.ciiva.com/8046/315376-8046930.pdf; ComponentLink3Description: https://datasheet.ciiva.com/8046/315376-8046930.pdf; ComponentLink4URL: https://datasheet.ciiva.com/26852/getdatasheetpartid-384170-26852203.pdf; ComponentLink4Description: https://datasheet.ciiva.com/26852/getdatasheetpartid-384170-26852203.pdf; ComponentLink5URL: https://datasheet.ciiva.com/6833/m20-999-6833368.pdf; ComponentLink5Description: https://datasheet.ciiva.com/6833/m20-999-6833368.pdf; Supplier Part Number 1: 855-M20-9990246
footprint HDR1X2 (Connector; Header; 2 Position)
pins: 1, 2

## HRG3216P-3900-D-T1
designator R?, comment 390R
RES SMD 390 OHM 0.5% 1W 1206; Manufacturer: Susumu; Manufacturer Part Number: HRG3216P-3900-D-T1; Temperature Coefficient: 25ppm/°C; Supplier 1: Digi-Key; Stock 1: 1320; Pricing 1: 1=0.97, 10=0.839, 100=0.5844 (USD); Case/Package: 1206; Case Code (Metric): 3216; Case Code (Imperial): 1206; Min Operating Temperature: -55°C; Max Operating Temperature: 125°C; Packaging: Tape and Reel; Resistance: 390R; Composition: Thin Film; Number of Terminations: 2; Tolerance: 0.5%; Max Power Dissipation: 1W; Features: Anti-Sulfur,Automotive AEC-Q200,Moisture Resistant; Length: 0.126inch; Height: 0.022inch; Width: 0.065inch; Supplier Part Number 1: 408-1917-1-ND
footprint Res1206
pins: 1, 2

## LPS3015-153MRB
designator L?
Fixed Inductors LPS3015 AEC-Q200 15uH SMD; Manufacturer: Coilcraft; Core Material: Ferrite; Inductance Tolerance: 20%; RMS Current (Irms): 440mA; Saturation Current: 610mA; DC Resistance (DCR): 700mR; Shielding: Shielded; Max DC Current: 620mA; Self Resonant Frequency: 35MHz; Test Frequency: 100kHz; Supplier 1: Mouser; Manufacturer Part Number: LPS3015-153MRB; Stock 1: 2416; Pricing 1: 1=1.14, 10=1, 50=0.888, 100=0.84, 1000=0.547, 10000=0.506 (USD); Weight: 0.001411oz; Min Operating Temperature: -40°C; Max Operating Temperature: 85°C; Packaging: Cut Tape; Inductance: 15uh; Termination: SMD/SMT; Tolerance: 20%; Package Quantity: 1; Length: 3mm; Height: 1.4mm; Width: 3mm; REACH SVHC: No SVHC; ComponentLink1URL: http://www.farnell.com/datasheets/1805321.pdf?src-supplier=Element14; ComponentLink1Description: http://www.farnell.com/datasheets/1805321.pdf?src-supplier=Element14; Supplier Part Number 1: 994-LPS3015-153MRB
footprint LPS3015-153MRB (Fixed Inductors LPS3015 AEC-Q200 15uH SMD)
pins: 1, 2

## LSM6DS3TR
designator U?
IMU ACCEL/GYRO I2C/SPI 14VFLGA; Manufacturer: STMicroelectronics; Min Supply Voltage: 1.71V; Max Supply Voltage: 3.6V; Sensor Type: 3 Axis,Accelerometer,Gyroscope; Output Type: Digital,I2C,SPI; Supplier 1: Digi-Key; Manufacturer Part Number: LSM6DS3TR; Stock 1: 23683; Pricing 1: 1=3, 10=2.697, 100=2.2094, 500=1.88078 (USD); Mount: Surface Mount; Case/Package: LGA; Number of Pins: 14; Contact Plating: Gold; Min Operating Temperature: -40°C; Max Operating Temperature: 85°C; REACH SVHC: No SVHC; Lead Free: Lead Free; Supplier Part Number 1: 497-15383-1-ND
footprint LSM6DS3TR (IMU ACCEL/GYRO I2C/SPI 14VFLGA)
pins: 1 SDO/SA0, 2 SDx, 3 SCx, 4 INT1, 5 VDDIO, 6 GND, 7 GND, 8 VDD, 9 INT2, 10 NC, 11 NC, 12 CS, 13 SCL, 14 SDA

## LSM9DS1TR
designator U?
IMU ACCEL/GYRO/MAG I2C/SPI 24LGA; Manufacturer: STMicroelectronics; Min Supply Voltage: 1.9V; Max Supply Voltage: 3.6V; Sensor Type: 3 Axis,Accelerometer,Gyroscope,Magnetometer; Output Type: I2C,SPI; Supplier 1: Digi-Key; Manufacturer Part Number: LSM9DS1TR; Stock 1: 16926; Pricing 1: 1=6.33, 10=5.716, 100=4.732 (USD); Case/Package: LGA; Number of Pins: 24; Min Operating Temperature: -40°C; Max Operating Temperature: 85°C; Packaging: Cut Tape; REACH SVHC: No SVHC; Lead Free: Lead Free; Supplier Part Number 1: 497-14946-1-ND
pins: 1 VDDIO, 2 SCL/SPC, 3 VDDIO, 4 SDA/SDI/SDO, 5 SDO_A/G, 6 SDO_M, 7 CS_A/G, 8 CS_M, 9 DRDY_M, 10 INT_M, 11 INT1_A/G, 12 INT2_A/G, 13 DEN_A/G, 14 RES, 15 RES, 16 RES, 17 RES, 18 RES, 19 GND, 20 GND, 21 CAP, 22 VDD, 23 VDD, 24 C1

## MBR120VLSFT3G
designator D?
DIODE SCHOTTKY 20V 1A SOD123FL; Manufacturer: ON Semiconductor; Max Surge Current: 45A; Forward Voltage: 340mV; Peak Reverse Current: 600uA; Element Configuration: Single; Polarity: Standard; Supplier 1: Digi-Key; Manufacturer Part Number: MBR120VLSFT3G; Stock 1: 130499; Pricing 1: 1=0.42, 10=0.338, 100=0.2298, 500=0.17234, 1000=0.12926 (USD); Number of Pins: 2; Min Operating Temperature: -65°C; Max Operating Temperature: 125°C; Package Quantity: 10000; Forward Current: 1A; Packaging: Tape and Reel; Max Reverse Leakage Current: 600uA; Average Rectified Current: 1A; Peak Non-Repetitive Surge Current: 45A; Max Repetitive Reverse Voltage (Vrrm): 20V; Max Forward Surge Current (Ifsm): 45A; Voltage Rating (DC): 20V; Current Rating: 1A; Output Current: 1A; Max Reverse Voltage (DC): 20V; Radiation Hardening: No; REACH SVHC: No SVHC; Lead Free: Lead Free; Halogen Free: Halogen Free; ComponentLink1URL: http://www.mouser.com/ds/2/308/MBR120VLSFT1-D-107081.pdf?src-supplier=Mouser; ComponentLink1Description: http://www.mouser.com/ds/2/308/MBR120VLSFT1-D-107081.pdf?src-supplier=Mouser; ComponentLink2URL: http://www.onsemi.com/pub/Collateral/MBR120VLSFT1-D.PDF?src-supplier=Digi-Key; ComponentLink2Description: http://www.onsemi.com/pub/Collateral/MBR120VLSFT1-D.PDF?src-supplier=Digi-Key; ComponentLink3URL: http://www.onsemi.cn/pub_link/Collateral/MBR120VLSFT1-D.PDF?src-supplier=Avnet; ComponentLink3Description: http://www.onsemi.cn/pub_link/Collateral/MBR120VLSFT1-D.PDF?src-supplier=Avnet; Supplier Part Number 1: MBR120VLSFT3GOSCT-ND
footprint MBR120VLSFT3G (DIODE SCHOTTKY 20V 1A SOD123FL)
pins: 1 A, 2 K

## Micro Usb Conn SMD
designator USB?, comment 10118192-0001LF
CONN USB MICRO B RECPT SMT R/A; Manufacturer: Amphenol FCI; Gender: Receptacle; Current Rating: 1.8A; Connector Type: USB,Receptacle; Number of Contacts: 5; Insulation Resistance: 1GR; Number of Ports: 1; Max Voltage Rating (AC): 100V; USB Standard: USB 2.0; Pitch: 0.65mm; Supplier 1: Digi-Key; Manufacturer Part Number: 10118192-0001LF; Stock 1: 203283; Pricing 1: 1=0.42, 10=0.393, 25=0.3536, 50=0.3144, 100=0.3013, 250=0.2751, 500=0.262 (USD); Mount: Surface Mount,Horizontal; Contact Material: Copper Alloy; Contact Plating: Nickel,Gold; Colour: Black; Number of Terminals: 5; Housing Material: Polymer; Min Operating Temperature: -55°C; Max Operating Temperature: 85°C; Termination: Solder; Orientation: Right Angle; Packaging: Tape and Reel; Package Quantity: 1400; Voltage Rating: 100V; Length: 7.86mm; Depth: 5.57mm; Radiation Hardening: No; Lead Free: Lead Free; Flammability Rating: UL94 V-0; REACH SVHC: No SVHC; ComponentLink1URL: https://datasheet.ciiva.com/26853/getdatasheetpartid-418041-26853891.pdf; ComponentLink1Description: https://datasheet.ciiva.com/26853/getdatasheetpartid-418041-26853891.pdf; ComponentLink2URL: https://datasheet.ciiva.com/851/10118192-851112.pdf; ComponentLink2Description: https://datasheet.ciiva.com/851/10118192-851112.pdf; ComponentLink3URL: https://datasheet.ciiva.com/4598/10118192ac-197249-4598796.pdf; ComponentLink3Description: https://datasheet.ciiva.com/4598/10118192ac-197249-4598796.pdf; Supplier Part Number 1: 609-4613-1-ND
footprint Micro Usb Conn SMD
pins: 1 V BUS (5V) "USB Vcc [Red]", 2 D- "USB Data - [White]", 3 D+ "USB Data + [Green]", 4 NC "Not Connected (or joined to pin 5 via resistor)", 5 GND "Ground [Black]", MP1 Tab "Shell", MP2 Tab "Shell", MP3 Tab "Shell", MP4 Tab "Shell", MP5 Tab "Shell", MP6 Tab "Shell"

## Mirco USB Connector
designator USB?, comment Mcro USB connector SMD
Mcro USB connector SMD (B Type); Manufacturer: Molex; Manufacturer Part No.: 47642-0011; Package: SMD
footprint USB (Mcro USB connector SMD (B type))
pins: 1, 2, 3, 4, 5, MH1, MH2, MH3, MH4

## MM3Z3V3B
designator D?
DIODE ZENER 3.3V 200MW SOD323F; Manufacturer: ON Semiconductor / Fairchild; Forward Voltage: 1V; Tolerance: 2%; Impedance: 89R; Max Reverse Leakage Current: 4.5uA; Test Current: 5mA; Element Configuration: Single; Supplier 1: Digi-Key; Manufacturer Part Number: MM3Z3V3B; Stock 1: 473644; Pricing 1: 1=0.22, 10=0.18, 100=0.0956, 500=0.06288, 1000=0.04276 (USD); Mount: Surface Mount; Number of Pins: 2; Weight: 0.0276g; Min Operating Temperature: -65°C; Max Operating Temperature: 150°C; Packaging: Tape and Reel; Package Quantity: 1; Max Power Dissipation: 200mW; Zener Voltage: 3.3V; Voltage Tolerance: 2%; Power Dissipation: 200mW; Working Voltage: 3.3V; Peak Reverse Current: 4.5uA; Length: 1.3mm; Height: 1mm; Width: 1.7mm; Radiation Hardening: No; REACH SVHC: No SVHC; Lead Free: Lead Free; ComponentLink1URL: http://www.onsemi.com/pub/Collateral/MM3Z9V1B-D.pdf?src-supplier=Digi-Key; ComponentLink1Description: http://www.onsemi.com/pub/Collateral/MM3Z9V1B-D.pdf?src-supplier=Digi-Key; ComponentLink2URL: http://www.mouser.com/ds/2/149/MM3Z3V3B-187166.pdf?src-supplier=Mouser; ComponentLink2Description: http://www.mouser.com/ds/2/149/MM3Z3V3B-187166.pdf?src-supplier=Mouser; ComponentLink3URL: https://www.fairchildsemi.com/datasheets/MM/MM3Z9V1B.pdf?src-supplier=Avnet; ComponentLink3Description: https://www.fairchildsemi.com/datasheets/MM/MM3Z9V1B.pdf?src-supplier=Avnet; ComponentLink4URL: http://www.farnell.com/datasheets/1706525.pdf?src-supplier=Element14; ComponentLink4Description: http://www.farnell.com/datasheets/1706525.pdf?src-supplier=Element14; Supplier Part Number 1: MM3Z3V3BCT-ND
footprint MM3Z3V3B (DIODE ZENER 3.3V 200MW SOD323F)
pins: 1 CATHODE, 2 ANODE

## MMBT2222A-7-F
designator Q?
TRANS NPN 40V 0.6A SMD SOT23-3; Manufacturer: Diodes; Max Power Dissipation: 300mW; Collector Base Voltage (VCBO): 75V; Max Collector Current: 600mA; hFE Min: 100; Frequency: 300MHz; Number of Elements: 1; Emitter Base Voltage (VEBO): 6V; Collector Emitter Saturation Voltage: 1V; Power Dissipation: 350mW; Element Configuration: Single; Current: 1A; Supplier 1: Digi-Key; Manufacturer Part Number: MMBT2222A-7-F; Stock 1: 2471182; Pricing 1: 1=0.15, 10=0.134, 100=0.0729, 500=0.04486, 1000=0.03059 (USD); Mount: Surface Mount; Case/Package: SOT-23; Number of Pins: 3; Weight: 0.000282oz; Contact Plating: Matte,Tin; Min Operating Temperature: -55°C; Max Operating Temperature: 150°C; Packaging: Tape and Reel; Collector Emitter Voltage (VCEO): 40V; Polarity: NPN; Voltage Rating (DC): 40V; Package Quantity: 3000; Continuous Collector Current: 600mA; Collector Emitter Breakdown Voltage: 40V; Transition Frequency: 300MHz; Max Breakdown Voltage: 40V; Max Frequency: 300MHz; Termination: SMD/SMT; Gain Bandwidth Product: 300MHz; Current Rating: 600mA; Voltage: 40V; Length: 3.05mm; Height: 1mm; Width: 1.4mm; Radiation Hardening: No; Lead Free: Lead Free; REACH SVHC: No SVHC; ComponentLink1URL: http://www.diodes.com/datasheets/ds30041.pdf?src-supplier=Future+Electronics; ComponentLink1Description: http://www.diodes.com/datasheets/ds30041.pdf?src-supplier=Future+Electronics; ComponentLink2URL: http://www.diodes.com/datasheets/ds30041.pdf?src-supplier=Avnet; ComponentLink2Description: http://www.diodes.com/datasheets/ds30041.pdf?src-supplier=Avnet; ComponentLink3URL: https://www.verical.com/server-webapp/html/getDatasheet?partID=82692&src-supplier=Verical; ComponentLink3Description: https://www.verical.com/server-webapp/html/getDatasheet?partID=82692&src-supplier=Verical; ComponentLink4URL: https://www.diodes.com/assets/Datasheets/ds30041.pdf?src-supplier=Digi-Key; ComponentLink4Description: https://www.diodes.com/assets/Datasheets/ds30041.pdf?src-supplier=Digi-Key; ComponentLink5URL: http://www.diodes.com/datasheets/ds30041.pdf?src-supplier=Avnet+Europe; ComponentLink5Description: http://www.diodes.com/datasheets/ds30041.pdf?src-supplier=Avnet+Europe; ComponentLink6URL: http://www.diodes.com/datasheets/ds30041.pdf?src-supplier=Element14; ComponentLink6Description: http://www.diodes.com/datasheets/ds30041.pdf?src-supplier=Element14; Supplier Part Number 1: MMBT2222A-FDIDKR-ND
footprint SOT23-3 (SOT23, 3-Leads, Body 2.9x1.3mm, Pitch 0.95mm, Lead Span 2.3mm - Reverse Pinning, IPC High Density)
pins: 1 B, 2 E, 3 C

## NR6028T1R5N
designator L?
FIXED IND 1.5UH 4.2A 20.8 MOHM; Manufacturer: Taiyo Yuden; Manufacturer Part Number: NR6028T470M; Core Material: Ferrite; Tolerance: 20%; Current Rating: 920mA; Saturation Current: 950mA; Shielding: Shielded; Self Resonant Frequency: 8MHz; Inductance: 47uh; DC Resistance (DCR): 390mR; Test Frequency: 100kHz; Supplier 1: Digi-Key; Stock 1: 42241; Pricing 1: 1=0.36, 10=0.317, 100=0.2182, 500=0.18648, 1000=0.14283 (USD); Mount: Surface Mount; Case/Package: 2424; Number of Pins: 2; Min Operating Temperature: -25°C; Max Operating Temperature: 120°C; Packaging: Tape and Reel; Package Quantity: 2000; Inductance Tolerance: 20%; Composition: Wirewound; Max DC Current: 920mA; Termination: SMD/SMT; RMS Current (Irms): 920mA; Length: 0.236inch; Height: 2.8mm; Width: 0.236inch; Height - Seated (Max): 0.11inch; REACH SVHC: Unknown; Halogen Free: Halogen Free; ComponentLink1URL: https://www.yuden.co.jp/productdata/catalog/wound04_e.pdf?src-supplier=Avnet; ComponentLink1Description: https://www.yuden.co.jp/productdata/catalog/wound04_e.pdf?src-supplier=Avnet; ComponentLink2URL: https://www.yuden.co.jp/productdata/catalog/wound04_e.pdf?src-supplier=Digi-Key; ComponentLink2Description: https://www.yuden.co.jp/productdata/catalog/wound04_e.pdf?src-supplier=Digi-Key; ComponentLink3URL: https://www.yuden.co.jp/productdata/catalog/wound04_e.pdf?src-supplier=Onlinecomponents.com; ComponentLink3Description: https://www.yuden.co.jp/productdata/catalog/wound04_e.pdf?src-supplier=Onlinecomponents.com; ComponentLink4URL: https://www.yuden.co.jp/productdata/catalog/wound04_e.pdf?src-supplier=Mouser; ComponentLink4Description: https://www.yuden.co.jp/productdata/catalog/wound04_e.pdf?src-supplier=Mouser; Supplier Part Number 1: 587-2104-1-ND
footprint NR6028T1R5N (FIXED IND 1.5UH 4.2A 20.8 MOHM)
pins: 1, 2

## OS102011MA1QN1
designator SW?  (value not drawn)
2 Position SPDT Miniature Slide Switch 100MA 12V Through Hole, Right Angle; Manufacturer: ITT C&K; Mechanical Life: 10000Cycles; Body Material: Tin; Actuator Material: Polyoxymethylene,Acetal,Polyacetal; Contact Resistance: 20mR; Contact Style: Non-Shorting; Insulation Resistance: 100MR; Switch Travel: 2mm; Switch Function: On-On; Actuator Type: Standard; Actuator Length: 4mm; Supplier 1: Digi-Key; Manufacturer Part Number: OS102011MA1QN1; Stock 1: 24069; Pricing 1: 1=0.38, 10=0.363, 25=0.3552, 50=0.3176, 100=0.3024, 250=0.2948, 500=0.2495, 1000=0.2419, 5000=0.2117 (USD); Mount: Through Hole,Brackets,PCB; Contact Material: Copper Alloy,Brass,Silver; Contact Plating: Silver,Gold; Housing Material: Resin; Min Operating Temperature: -10°C; Max Operating Temperature: 70°C; Packaging: Bulk; Throw Configuration: SPDT; Voltage Rating (DC): 12V; Max Current Rating: 100mA; Contact Current Rating: 100mA; Max Voltage Rating (DC): 12V; Package Quantity: 300; Current Rating: 100mA; Termination: PC Pins; Electrical Life: 10000Cycles; Orientation: Right Angle; Length: 8.6mm; Width: 4.4mm; Depth: 8.4mm; Radiation Hardening: No; REACH SVHC: No SVHC; Lead Free: Lead Free; ComponentLink1URL: http://www.jameco.com/Jameco/Products/ProdDS/588220.pdf?src-supplier=Jameco; ComponentLink1Description: http://www.jameco.com/Jameco/Products/ProdDS/588220.pdf?src-supplier=Jameco; ComponentLink2URL: http://uk.rs-online.com/webdocs/1263/0900766b81263f61.pdf?src-supplier=RSComponents; ComponentLink2Description: http://uk.rs-online.com/webdocs/1263/0900766b81263f61.pdf?src-supplier=RSComponents; ComponentLink3URL: http://www.farnell.com/datasheets/1683358.pdf?src-supplier=Element14; ComponentLink3Description: http://www.farnell.com/datasheets/1683358.pdf?src-supplier=Element14; ComponentLink4URL: http://www1.futureelectronics.com/doc/C%20-%20K%20COMPONENTS/OS102011MA1QN1.pdf?src-supplier=Future+Electronics; ComponentLink4Description: http://www1.futureelectronics.com/doc/C%20-%20K%20COMPONENTS/OS102011MA1QN1.pdf?src-supplier=Future+Electronics; ComponentLink5URL: https://www.ckswitches.com/media/1428/os.pdf?src-supplier=Digi-Key; ComponentLink5Description: https://www.ckswitches.com/media/1428/os.pdf?src-supplier=Digi-Key; ComponentLink6URL: https://www.alliedelec.com/m/d/08271ccc8b1809c6b911a7d3c93f3e8a.pdf?src-supplier=Allied+Electronics; ComponentLink6Description: https://www.alliedelec.com/m/d/08271ccc8b1809c6b911a7d3c93f3e8a.pdf?src-supplier=Allied+Electronics; ComponentLink7URL: http://www.farnell.com/datasheets/2674787.pdf?src-supplier=Newark; ComponentLink7Description: http://www.farnell.com/datasheets/2674787.pdf?src-supplier=Newark; Supplier Part Number 1: CKN9559-ND
footprint OS102011MA1QN1 (2 Position SPDT Miniature Slide Switch 100MA 12V Through Hole, Right Angle)
pins: 1 +, 2 +, 3 +, MH1, MH2

## PC3H712NIP1H
designator U?
OPTOISOLATOR TRANSISTOR SMD; Manufacturer: Socle Technology; Supplier 1: Digikey; Manufacturer Part Number: PC3H712NIP1H; Stock 1: 61000; Pricing 1: 1=0.87, 10=0.678, 25=0.5616, 100=0.484, 250=0.42592, 500=0.36784, 1000=0.2904 (USD); Supplier Part Number 1: 1855-1008-1-ND
footprint PC3H712NIP1H (OPTOISOLATOR TRANSISTOR SMD)
pins: 1 An, 2 Ca, 3 E, 4 C

## PS2801C-1-F3-A
designator U?
TransistorOptocouplers DC 1 2500Vrms SOP-4_P1.27 Optocouplers RoHS; Manufacturer: CEL; Number of Channels: 1; Collector Emitter Voltage (VCEO): 300mV; Forward Voltage: 1.2V; Max Power Dissipation: 120mW; Max Collector Current: 30mA; Max Output Voltage: 80V; Supplier 1: Digi-Key; Manufacturer Part Number: PS2801C-1-F3-A; Stock 1: 399; Pricing 1: 1=0.77, 10=0.595, 100=0.3825 (USD); Mount: Surface Mount; Case/Package: SOIC; Number of Pins: 4; Min Operating Temperature: -55°C; Max Operating Temperature: 100°C; Packaging: Tape and Reel; Collector Emitter Saturation Voltage: 300mV; Package Quantity: 1; Output Current per Channel: 30mA; Lead Free: Lead Free; ComponentLink1URL: http://www.cel.com/pdf/datasheets/PS2801C-1,PS2801C-4.pdf?src-supplier=Digi-Key; ComponentLink1Description: http://www.cel.com/pdf/datasheets/PS2801C-1,PS2801C-4.pdf?src-supplier=Digi-Key; ComponentLink2URL: http://www.cel.com/pdf/datasheets/how_to_order_optos.pdf?src-supplier=Digi-Key; ComponentLink2Description: http://www.cel.com/pdf/datasheets/how_to_order_optos.pdf?src-supplier=Digi-Key; ComponentLink3URL: http://datasheet.iiic.cc/cel/PS2801C-1-F3-A.pdf?src-supplier=IIIC; ComponentLink3Description: http://datasheet.iiic.cc/cel/PS2801C-1-F3-A.pdf?src-supplier=IIIC; Supplier Part Number 1: PS2801C-1-F3-ACT-ND
footprint PS2801C-1-F3-A
pins: 1 An, 2 Ca, 3 E, 4 C